# Altium integrated library UDN2981A-T.IntLib: 1 symbol
Pins are listed as number, name and electrical type; pins without a type are passive.

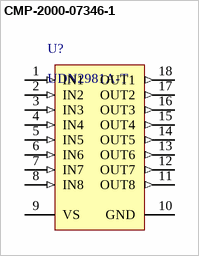
[diagram p0: symbol CMP-2000-07346-1]

## CMP-2000-07346-1
designator U?, comment UDN2981A-T
8-Channel Source Driver, 15 V Input, -20 to 85 degC, 18-Pin DIP, RoHS, Tube; Manufacturer: Allegro Microsystems; Number of Outputs: 8; Current - Output / Channel: 120mA; Other Names: 620-1120; Input Type: Non-Inverting; Current - Peak Output: 500mA; Voltage - Supply: 25V; Product Change Notification: UDN298xAx-TLTBNotice30/Apr/2012; Mounting Type: ThroughHole; Type: HighSide; Mounting Technology: ThroughHole; Package Description: 18-Pin Double In-line Package, Body 22.86 x 6.605 mm, Pitch 2.54 mm; Category: IntegratedCircuits(ICs); Standard Package: 21; On-State Resistance: -; Package / Case: 18-DIP(0.300",7.62mm); Operating Temperature: -20°C~85°C; Datasheet URL: https://datasheet.ciiva.com/19456/1762681-19456617.pdf; Supplier Device Package: 18-DIP; Package Reference: DIP-18; Series: -; Family: PMIC-MOSFET,BridgeDrivers-InternalSwitch; Packaging: Tube; Manufacturer URL: http://www.allegromicro.com/
footprint ALEG-DIP-18 (DIP, 8-Leads, Body 23.35x7.1mm, Pitch 2.54mm)
pins: 1 IN1 (in), 2 IN2 (in), 3 IN3 (in), 4 IN4 (in), 5 IN5 (in), 6 IN6 (in), 7 IN7 (in), 8 IN8 (in), 9 VS (power), 10 GND (power), 11 OUT8 (out), 12 OUT7 (out), 13 OUT6 (out), 14 OUT5 (out), 15 OUT4 (out), 16 OUT3 (out), 17 OUT2 (out), 18 OUT1 (out)